# Altium footprint library 1N5819WS_C191023.PcbLib: 1 footprints
Each footprint in its own frame and in the unit in brackets; x right, y up, seen from the top. Pads: shape width x height; smd on the part's side, far side on the other; paste and mask are expansions set on the pad; w line width, h text height; cw(c..) or ccw(c..) is an arc to the next point about the centre after c.
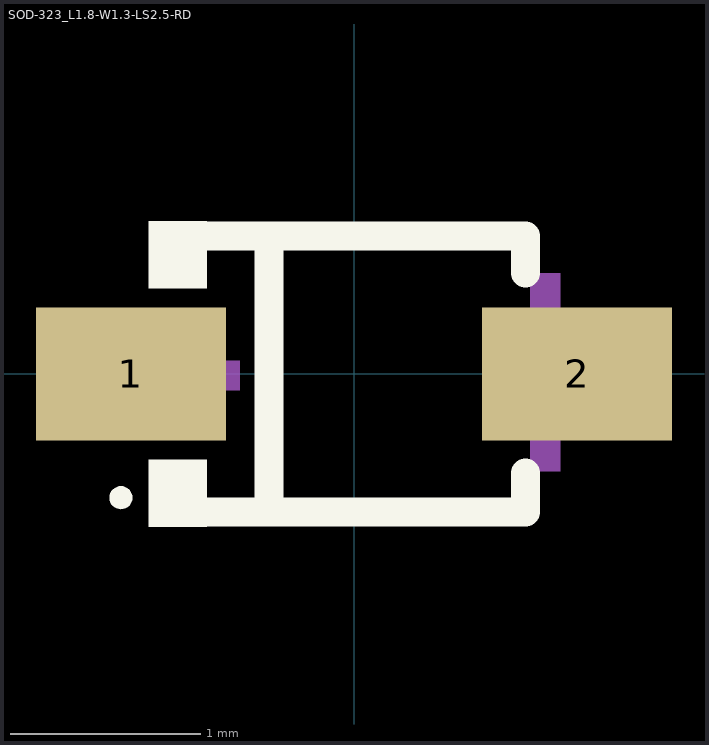
[diagram p0: the footprint, top view; thin cyan lines are the x and y axes]

## SOD-323_L1.8-W1.3-LS2.5-RD [mm] "电压:40V 电流:1A 正向压降(Vf):600mV@1A 直流反向耐压(Vr):40V 整流电流:1A 型号:1N5819WS_C191023 LCSC C191023 厂牌:Hottech(合科泰)"
height 1
pads (2):
  rect 1x0.7 smd mask+0.05: 1(-1.172,0) 2(1.172,0)
Top Overlay:
  region: -1.165,-0.65 -1.166,-0.639 -1.17,-0.627 -1.175,-0.617 -1.183,-0.608 -1.192,-0.6 -1.202,-0.595 -1.213,-0.591 -1.225,-0.59 -1.237,-0.591 -1.248,-0.595 -1.258,-0.6 -1.267,-0.608 -1.275,-0.617 -1.28,-0.627 -1.284,-0.639 -1.285,-0.65 -1.284,-0.662 -1.28,-0.673 -1.275,-0.684 -1.267,-0.693 -1.258,-0.7 -1.248,-0.706 -1.237,-0.709 -1.225,-0.71 -1.213,-0.709 -1.202,-0.706 -1.192,-0.7 -1.183,-0.693 -1.175,-0.684 -1.17,-0.673 -1.166,-0.662
  region: -0.775,-0.803 -0.775,-0.45 -1.08,-0.45 -1.08,-0.803
  region: -0.775,0.802 -0.775,0.45 -1.08,0.45 -1.08,0.802
  lines w0.152: -0.851,-0.726 0.901,-0.726 0.901,-0.52 ; -0.851,0.726 0.901,0.726 0.901,0.53 ; -0.447,-0.726 -0.447,0.726
Mechanical 2:
  region: 1.083,0.53 1.083,-0.51 0.927,-0.51 0.927,0.53
  region: 1.315,0.09 1.315,-0.066 0.691,-0.066 0.691,0.09
  region: -1.225,0.07 -1.225,-0.086 -0.601,-0.086 -0.601,0.07
3D body "SOD-323_L1.8-W1.3-LS2.5-RD.step": height 1, standoff 0, extent -1.772,-0.903 1.772,0.902